# Altium footprint library WR-PHD_Pin Header_2.54mm.PcbLib: 137 footprints (part 9 of 9)
Each footprint in its own frame and in the unit in brackets; x right, y up, seen from the top. Pads: shape width x height; smd on the part's side, far side on the other; paste and mask are expansions set on the pad; w line width, h text height; cw(c..) or ccw(c..) is an arc to the next point about the centre after c.
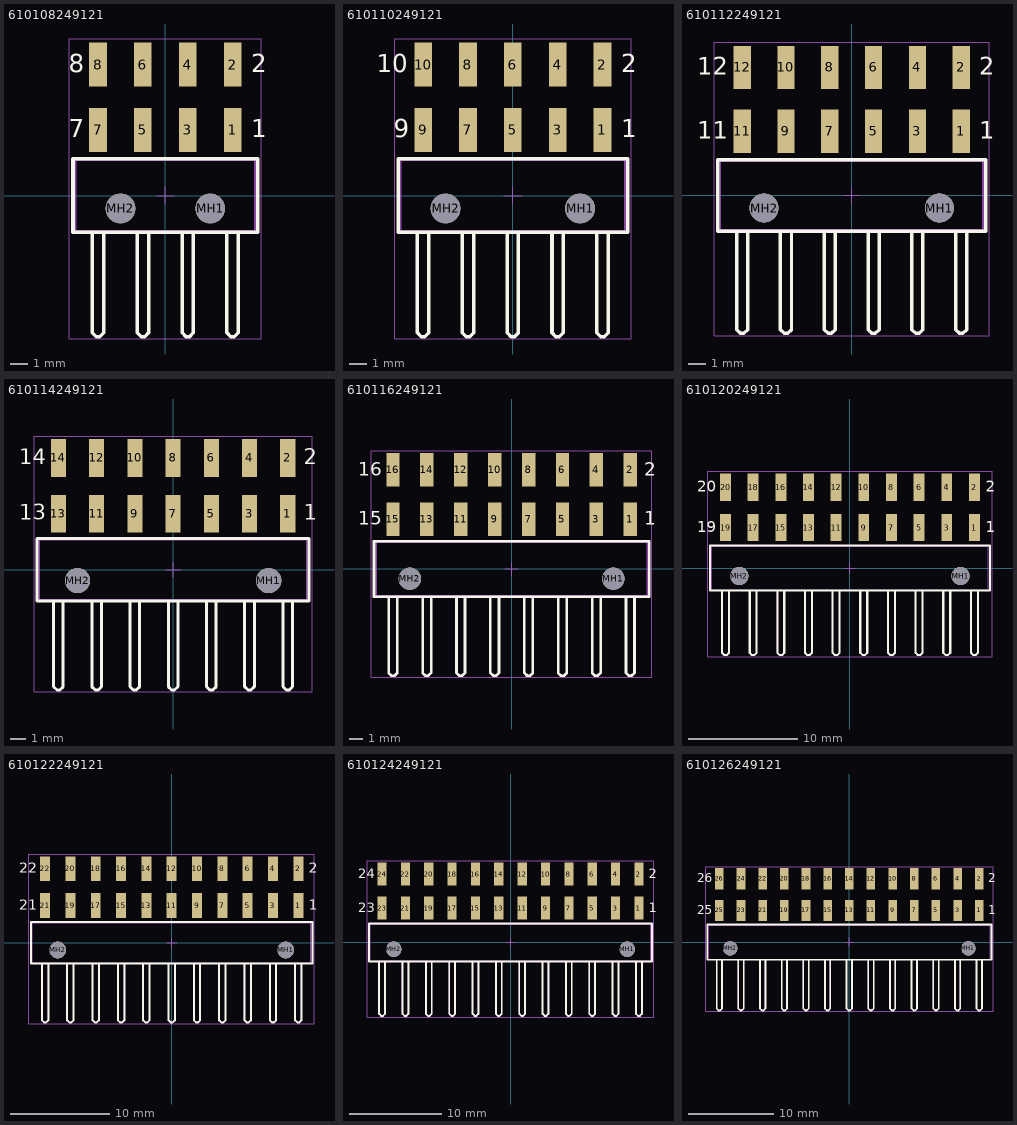
[diagram p8: the footprints below, top view; thin cyan lines are the x and y axes]

## 610108249121 [mm] "Pin Header, pitch 2.54 mm, SMD, Angled, dual row, 8p"
height 5.08
pads (10):
  rect 1x2.5 smd: 1(3.81,3.72) 2(3.81,7.42) 3(1.27,3.72) 4(1.27,7.42) 5(-1.27,3.72) 6(-1.27,7.42) 7(-3.81,3.72) 8(-3.81,7.42)
  round 1.68 hole 1.68 unplated: MH1(2.54,-0.73) MH2(-2.54,-0.73)
Top Overlay:
  lines w0.2: -4.13,-2.075 -4.13,-7.375 -4.13,-7.655 -4.13,-7.78 -3.91,-8 -3.71,-8 -3.49,-7.78 -3.49,-7.655 -3.49,-7.375 -3.49,-2.075 ; -1.59,-2.075 -1.59,-7.375 -1.59,-7.655 -1.59,-7.78 -1.37,-8 -1.17,-8 -0.95,-7.78 -0.95,-7.655 -0.95,-7.375 -0.95,-2.075 ; 0.95,-2.075 0.95,-7.375 0.95,-7.655 0.95,-7.78 1.17,-8 1.37,-8 1.59,-7.78 1.59,-7.655 1.59,-7.375 1.59,-2.075 ; 3.49,-2.075 3.49,-7.375 3.49,-7.655 3.49,-7.78 3.71,-8 3.91,-8 4.13,-7.78 4.13,-7.655 4.13,-7.375 4.13,-2.075 ; -5.23,-2.075 -5.23,2.075 5.23,2.075 5.23,-2.075 -5.23,-2.075
  text "2" at 4.87,7 h1.02
  text "1" at 4.87,3.3 h1.02
  text "8" at -5.47,7 h1.02
  text "7" at -5.47,3.3 h1.02
Mechanical 13:
  lines w0.1: -4.13,-2 -4.13,-7.375 -4.13,-7.655 -4.13,-7.78 -3.91,-8 -3.71,-8 -3.49,-7.78 -3.49,-7.655 -3.49,-7.375 -3.49,-2 ; -1.59,-2 -1.59,-7.375 -1.59,-7.655 -1.59,-7.78 -1.37,-8 -1.17,-8 -0.95,-7.78 -0.95,-7.655 -0.95,-7.375 -0.95,-2 ; 0.95,-2 0.95,-7.375 0.95,-7.655 0.95,-7.78 1.17,-8 1.37,-8 1.59,-7.78 1.59,-7.655 1.59,-7.375 1.59,-2 ; 3.49,-2 3.49,-7.375 3.49,-7.655 3.49,-7.78 3.71,-8 3.91,-8 4.13,-7.78 4.13,-7.655 4.13,-7.375 4.13,-2 ; -5.08,-2 5.08,-2 5.08,2 -5.08,2 -5.08,-2
Mechanical 15:
  lines w0.05: -0.5,0 0.5,0 ; 0,-0.5 0,0.5 ; -5.43,-8.125 -5.43,8.87 5.43,8.87 5.43,-8.125 -5.43,-8.125
3D body "610108249121.stp": height 5.1, standoff -1.38, extent -5.08,-8 5.08,8.16

## 610110249121 [mm] "Pin Header, pitch 2.54 mm, SMD, Angled, dual row, 10p"
height 5.08
pads (12):
  rect 1x2.5 smd: 1(5.08,3.72) 2(5.08,7.42) 3(2.54,3.72) 4(2.54,7.42) 5(0,3.72) 6(0,7.42) 7(-2.54,3.72) 8(-2.54,7.42) 9(-5.08,3.72) 10(-5.08,7.42)
  round 1.68 hole 1.68 unplated: MH1(3.81,-0.73) MH2(-3.81,-0.73)
Top Overlay:
  lines w0.2: -5.4,-2.075 -5.4,-7.375 -5.4,-7.655 -5.4,-7.78 -5.18,-8 -4.98,-8 -4.76,-7.78 -4.76,-7.655 -4.76,-7.375 -4.76,-2.075 ; -2.86,-2.075 -2.86,-7.375 -2.86,-7.655 -2.86,-7.78 -2.64,-8 -2.44,-8 -2.22,-7.78 -2.22,-7.655 -2.22,-7.375 -2.22,-2.075 ; -0.32,-2.075 -0.32,-7.375 -0.32,-7.655 -0.32,-7.78 -0.1,-8 0.1,-8 0.32,-7.78 0.32,-7.655 0.32,-7.375 0.32,-2.075 ; 2.22,-2.075 2.22,-7.375 2.22,-7.655 2.22,-7.78 2.44,-8 2.64,-8 2.86,-7.78 2.86,-7.655 2.86,-7.375 2.86,-2.075 ; 4.76,-2.075 4.76,-7.375 4.76,-7.655 4.76,-7.78 4.98,-8 5.18,-8 5.4,-7.78 5.4,-7.655 5.4,-7.375 5.4,-2.075 ; -6.5,-2.075 6.5,-2.075 6.5,2.075 -6.5,2.075 -6.5,-2.075
  text "1" at 6.14,3.3 h1.02
  text "2" at 6.14,7 h1.02
  text "10" at -7.7,7 h1.02
  text "9" at -6.74,3.3 h1.02
Mechanical 13:
  lines w0.1: -5.4,-2 -5.4,-7.375 -5.4,-7.655 -5.4,-7.78 -5.18,-8 -4.98,-8 -4.76,-7.78 -4.76,-7.655 -4.76,-7.375 -4.76,-2 ; -2.86,-2 -2.86,-7.375 -2.86,-7.655 -2.86,-7.78 -2.64,-8 -2.44,-8 -2.22,-7.78 -2.22,-7.655 -2.22,-7.375 -2.22,-2 ; -0.32,-2 -0.32,-7.375 -0.32,-7.655 -0.32,-7.78 -0.1,-8 0.1,-8 0.32,-7.78 0.32,-7.655 0.32,-7.375 0.32,-2 ; 2.22,-2 2.22,-7.375 2.22,-7.655 2.22,-7.78 2.44,-8 2.64,-8 2.86,-7.78 2.86,-7.655 2.86,-7.375 2.86,-2 ; 4.76,-2 4.76,-7.375 4.76,-7.655 4.76,-7.78 4.98,-8 5.18,-8 5.4,-7.78 5.4,-7.655 5.4,-7.375 5.4,-2 ; -6.35,-2 -6.35,2 6.35,2 6.35,-2 -6.35,-2
Mechanical 15:
  lines w0.05: -0.5,0 0.5,0 ; 0,-0.5 0,0.5 ; -6.7,-8.125 6.7,-8.125 6.7,8.87 -6.7,8.87 -6.7,-8.125
3D body "610110249121.stp": height 5.1, standoff -1.38, extent -6.35,-8 6.35,8.16

## 610112249121 [mm] "Pin Header, pitch 2.54 mm, SMD, Angled, dual row, 12p"
height 5.08
pads (14):
  rect 1x2.5 smd: 1(6.35,3.72) 2(6.35,7.42) 3(3.81,3.72) 4(3.81,7.42) 5(1.27,3.72) 6(1.27,7.42) 7(-1.27,3.72) 8(-1.27,7.42) 9(-3.81,3.72) 10(-3.81,7.42) 11(-6.35,3.72) 12(-6.35,7.42)
  round 1.68 hole 1.68 unplated: MH1(5.08,-0.73) MH2(-5.08,-0.73)
Top Overlay:
  lines w0.2: -6.67,-2.075 -6.67,-7.375 -6.67,-7.655 -6.67,-7.78 -6.45,-8 -6.25,-8 -6.03,-7.78 -6.03,-7.655 -6.03,-7.375 -6.03,-2.075 ; -4.13,-2.075 -4.13,-7.375 -4.13,-7.655 -4.13,-7.78 -3.91,-8 -3.71,-8 -3.49,-7.78 -3.49,-7.655 -3.49,-7.375 -3.49,-2.075 ; -1.59,-2.075 -1.59,-7.375 -1.59,-7.655 -1.59,-7.78 -1.37,-8 -1.17,-8 -0.95,-7.78 -0.95,-7.655 -0.95,-7.375 -0.95,-2.075 ; 0.95,-2.075 0.95,-7.375 0.95,-7.655 0.95,-7.78 1.17,-8 1.37,-8 1.59,-7.78 1.59,-7.655 1.59,-7.375 1.59,-2.075 ; 3.49,-2.075 3.49,-7.375 3.49,-7.655 3.49,-7.78 3.71,-8 3.91,-8 4.13,-7.78 4.13,-7.655 4.13,-7.375 4.13,-2.075 ; 6.03,-2.075 6.03,-7.375 6.03,-7.655 6.03,-7.78 6.25,-8 6.45,-8 6.67,-7.78 6.67,-7.655 6.67,-7.375 6.67,-2.075 ; -7.77,-2.075 7.77,-2.075 7.77,2.075 -7.77,2.075 -7.77,-2.075
  text "1" at 7.41,3.3 h1.02
  text "2" at 7.41,7 h1.02
  text "11" at -8.97,3.3 h1.02
  text "12" at -8.97,7 h1.02
Mechanical 13:
  lines w0.1: -6.67,-2 -6.67,-7.375 -6.67,-7.655 -6.67,-7.78 -6.45,-8 -6.25,-8 -6.03,-7.78 -6.03,-7.655 -6.03,-7.375 -6.03,-2 ; -4.13,-2 -4.13,-7.375 -4.13,-7.655 -4.13,-7.78 -3.91,-8 -3.71,-8 -3.49,-7.78 -3.49,-7.655 -3.49,-7.375 -3.49,-2 ; -1.59,-2 -1.59,-7.375 -1.59,-7.655 -1.59,-7.78 -1.37,-8 -1.17,-8 -0.95,-7.78 -0.95,-7.655 -0.95,-7.375 -0.95,-2 ; 0.95,-2 0.95,-7.375 0.95,-7.655 0.95,-7.78 1.17,-8 1.37,-8 1.59,-7.78 1.59,-7.655 1.59,-7.375 1.59,-2 ; 3.49,-2 3.49,-7.375 3.49,-7.655 3.49,-7.78 3.71,-8 3.91,-8 4.13,-7.78 4.13,-7.655 4.13,-7.375 4.13,-2 ; 6.03,-2 6.03,-7.375 6.03,-7.655 6.03,-7.78 6.25,-8 6.45,-8 6.67,-7.78 6.67,-7.655 6.67,-7.375 6.67,-2 ; -7.62,-2 -7.62,2 7.62,2 7.62,-2 -7.62,-2
Mechanical 15:
  lines w0.05: -0.5,0 0.5,0 ; 0,-0.5 0,0.5 ; -7.97,-8.125 7.97,-8.125 7.97,8.87 -7.97,8.87 -7.97,-8.125
3D body "610112249121.stp": height 5.1, standoff -1.38, extent -7.62,-8 7.62,8.16

## 610114249121 [mm] "Pin Header, pitch 2.54 mm, SMD, Angled, dual row, 14p"
height 5.08
pads (16):
  rect 1x2.5 smd: 1(7.62,3.72) 2(7.62,7.42) 3(5.08,3.72) 4(5.08,7.42) 5(2.54,3.72) 6(2.54,7.42) 7(0,3.72) 8(0,7.42) 9(-2.54,3.72) 10(-2.54,7.42) 11(-5.08,3.72) 12(-5.08,7.42) 13(-7.62,3.72) 14(-7.62,7.42)
  round 1.68 hole 1.68 unplated: MH1(6.35,-0.73) MH2(-6.35,-0.73)
Top Overlay:
  lines w0.2: -7.94,-2.075 -7.94,-7.375 -7.94,-7.655 -7.94,-7.78 -7.72,-8 -7.52,-8 -7.3,-7.78 -7.3,-7.655 -7.3,-7.375 -7.3,-2.075 ; -5.4,-2.075 -5.4,-7.375 -5.4,-7.655 -5.4,-7.78 -5.18,-8 -4.98,-8 -4.76,-7.78 -4.76,-7.655 -4.76,-7.375 -4.76,-2.075 ; -2.86,-2.075 -2.86,-7.375 -2.86,-7.655 -2.86,-7.78 -2.64,-8 -2.44,-8 -2.22,-7.78 -2.22,-7.655 -2.22,-7.375 -2.22,-2.075 ; -0.32,-2.075 -0.32,-7.375 -0.32,-7.655 -0.32,-7.78 -0.1,-8 0.1,-8 0.32,-7.78 0.32,-7.655 0.32,-7.375 0.32,-2.075 ; 2.22,-2.075 2.22,-7.375 2.22,-7.655 2.22,-7.78 2.44,-8 2.64,-8 2.86,-7.78 2.86,-7.655 2.86,-7.375 2.86,-2.075 ; 4.76,-2.075 4.76,-7.375 4.76,-7.655 4.76,-7.78 4.98,-8 5.18,-8 5.4,-7.78 5.4,-7.655 5.4,-7.375 5.4,-2.075 ; 7.3,-2.075 7.3,-7.375 7.3,-7.655 7.3,-7.78 7.52,-8 7.72,-8 7.94,-7.78 7.94,-7.655 7.94,-7.375 7.94,-2.075 ; -9.04,-2.075 9.04,-2.075 9.04,2.075 -9.04,2.075 -9.04,-2.075
  text "1" at 8.68,3.3 h1.02
  text "2" at 8.68,7 h1.02
  text "14" at -10.24,7 h1.02
  text "13" at -10.24,3.3 h1.02
Mechanical 13:
  lines w0.1: -7.94,-2 -7.94,-7.375 -7.94,-7.655 -7.94,-7.78 -7.72,-8 -7.52,-8 -7.3,-7.78 -7.3,-7.655 -7.3,-7.375 -7.3,-2 ; -5.4,-2 -5.4,-7.375 -5.4,-7.655 -5.4,-7.78 -5.18,-8 -4.98,-8 -4.76,-7.78 -4.76,-7.655 -4.76,-7.375 -4.76,-2 ; -2.86,-2 -2.86,-7.375 -2.86,-7.655 -2.86,-7.78 -2.64,-8 -2.44,-8 -2.22,-7.78 -2.22,-7.655 -2.22,-7.375 -2.22,-2 ; -0.32,-2 -0.32,-7.375 -0.32,-7.655 -0.32,-7.78 -0.1,-8 0.1,-8 0.32,-7.78 0.32,-7.655 0.32,-7.375 0.32,-2 ; 2.22,-2 2.22,-7.375 2.22,-7.655 2.22,-7.78 2.44,-8 2.64,-8 2.86,-7.78 2.86,-7.655 2.86,-7.375 2.86,-2 ; 4.76,-2 4.76,-7.375 4.76,-7.655 4.76,-7.78 4.98,-8 5.18,-8 5.4,-7.78 5.4,-7.655 5.4,-7.375 5.4,-2 ; 7.3,-2 7.3,-7.375 7.3,-7.655 7.3,-7.78 7.52,-8 7.72,-8 7.94,-7.78 7.94,-7.655 7.94,-7.375 7.94,-2 ; -8.89,-2 -8.89,2 8.89,2 8.89,-2 -8.89,-2
Mechanical 15:
  lines w0.05: -0.5,0 0.5,0 ; 0,-0.5 0,0.5 ; -9.24,-8.125 9.24,-8.125 9.24,8.87 -9.24,8.87 -9.24,-8.125
3D body "610114249121.stp": height 5.1, standoff -1.38, extent -8.89,-8 8.89,8.16

## 610116249121 [mm] "Pin Header, pitch 2.54 mm, SMD, Angled, dual row, 16p"
height 5.08
pads (18):
  rect 1x2.5 smd: 1(8.89,3.72) 2(8.89,7.42) 3(6.35,3.72) 4(6.35,7.42) 5(3.81,3.72) 6(3.81,7.42) 7(1.27,3.72) 8(1.27,7.42) 9(-1.27,3.72) 10(-1.27,7.42) 11(-3.81,3.72) 12(-3.81,7.42) 13(-6.35,3.72) 14(-6.35,7.42) 15(-8.89,3.72) 16(-8.89,7.42)
  round 1.68 hole 1.68 unplated: MH1(7.62,-0.73) MH2(-7.62,-0.73)
Top Overlay:
  lines w0.2: -9.21,-2.075 -9.21,-7.375 -9.21,-7.655 -9.21,-7.78 -8.99,-8 -8.79,-8 -8.57,-7.78 -8.57,-7.655 -8.57,-7.375 -8.57,-2.075 ; -6.67,-2.075 -6.67,-7.375 -6.67,-7.655 -6.67,-7.78 -6.45,-8 -6.25,-8 -6.03,-7.78 -6.03,-7.655 -6.03,-7.375 -6.03,-2.075 ; -4.13,-2.075 -4.13,-7.375 -4.13,-7.655 -4.13,-7.78 -3.91,-8 -3.71,-8 -3.49,-7.78 -3.49,-7.655 -3.49,-7.375 -3.49,-2.075 ; -1.59,-2.075 -1.59,-7.375 -1.59,-7.655 -1.59,-7.78 -1.37,-8 -1.17,-8 -0.95,-7.78 -0.95,-7.655 -0.95,-7.375 -0.95,-2.075 ; 0.95,-2.075 0.95,-7.375 0.95,-7.655 0.95,-7.78 1.17,-8 1.37,-8 1.59,-7.78 1.59,-7.655 1.59,-7.375 1.59,-2.075 ; 3.49,-2.075 3.49,-7.375 3.49,-7.655 3.49,-7.78 3.71,-8 3.91,-8 4.13,-7.78 4.13,-7.655 4.13,-7.375 4.13,-2.075 ; 6.03,-2.075 6.03,-7.375 6.03,-7.655 6.03,-7.78 6.25,-8 6.45,-8 6.67,-7.78 6.67,-7.655 6.67,-7.375 6.67,-2.075 ; 8.57,-2.075 8.57,-7.375 8.57,-7.655 8.57,-7.78 8.79,-8 8.99,-8 9.21,-7.78 9.21,-7.655 9.21,-7.375 9.21,-2.075 ; -10.31,-2.075 10.31,-2.075 10.31,2.075 -10.31,2.075 -10.31,-2.075
  text "1" at 9.95,3.3 h1.02
  text "2" at 9.95,7 h1.02
  text "16" at -11.51,7 h1.02
  text "15" at -11.51,3.3 h1.02
Mechanical 13:
  lines w0.1: -9.21,-2 -9.21,-7.375 -9.21,-7.655 -9.21,-7.78 -8.99,-8 -8.79,-8 -8.57,-7.78 -8.57,-7.655 -8.57,-7.375 -8.57,-2 ; -6.67,-2 -6.67,-7.375 -6.67,-7.655 -6.67,-7.78 -6.45,-8 -6.25,-8 -6.03,-7.78 -6.03,-7.655 -6.03,-7.375 -6.03,-2 ; -4.13,-2 -4.13,-7.375 -4.13,-7.655 -4.13,-7.78 -3.91,-8 -3.71,-8 -3.49,-7.78 -3.49,-7.655 -3.49,-7.375 -3.49,-2 ; -1.59,-2 -1.59,-7.375 -1.59,-7.655 -1.59,-7.78 -1.37,-8 -1.17,-8 -0.95,-7.78 -0.95,-7.655 -0.95,-7.375 -0.95,-2 ; 0.95,-2 0.95,-7.375 0.95,-7.655 0.95,-7.78 1.17,-8 1.37,-8 1.59,-7.78 1.59,-7.655 1.59,-7.375 1.59,-2 ; 3.49,-2 3.49,-7.375 3.49,-7.655 3.49,-7.78 3.71,-8 3.91,-8 4.13,-7.78 4.13,-7.655 4.13,-7.375 4.13,-2 ; 6.03,-2 6.03,-7.375 6.03,-7.655 6.03,-7.78 6.25,-8 6.45,-8 6.67,-7.78 6.67,-7.655 6.67,-7.375 6.67,-2 ; 8.57,-2 8.57,-7.375 8.57,-7.655 8.57,-7.78 8.79,-8 8.99,-8 9.21,-7.78 9.21,-7.655 9.21,-7.375 9.21,-2 ; -10.16,-2 -10.16,2 10.16,2 10.16,-2 -10.16,-2
Mechanical 15:
  lines w0.05: -0.5,0 0.5,0 ; 0,-0.5 0,0.5 ; -10.51,-8.125 10.51,-8.125 10.51,8.87 -10.51,8.87 -10.51,-8.125
3D body "610116249121.stp": height 5.1, standoff -1.38, extent -10.16,-8 10.16,8.16

## 610120249121 [mm] "Pin Header, pitch 2.54 mm, SMD, Angled, dual row, 20p"
height 5.08
pads (22):
  rect 1x2.5 smd: 1(11.43,3.72) 2(11.43,7.42) 3(8.89,3.72) 4(8.89,7.42) 5(6.35,3.72) 6(6.35,7.42) 7(3.81,3.72) 8(3.81,7.42) 9(1.27,3.72) 10(1.27,7.42) 11(-1.27,3.72) 12(-1.27,7.42) 13(-3.81,3.72) 14(-3.81,7.42) 15(-6.35,3.72) 16(-6.35,7.42) 17(-8.89,3.72) 18(-8.89,7.42) 19(-11.43,3.72) 20(-11.43,7.42)
  round 1.68 hole 1.68 unplated: MH1(10.16,-0.73) MH2(-10.16,-0.73)
Top Overlay:
  lines w0.2: -11.75,-2.075 -11.75,-7.375 -11.75,-7.655 -11.75,-7.78 -11.53,-8 -11.33,-8 -11.11,-7.78 -11.11,-7.655 -11.11,-7.375 -11.11,-2.075 ; -9.21,-2.075 -9.21,-7.375 -9.21,-7.655 -9.21,-7.78 -8.99,-8 -8.79,-8 -8.57,-7.78 -8.57,-7.655 -8.57,-7.375 -8.57,-2.075 ; -6.67,-2.075 -6.67,-7.375 -6.67,-7.655 -6.67,-7.78 -6.45,-8 -6.25,-8 -6.03,-7.78 -6.03,-7.655 -6.03,-7.375 -6.03,-2.075 ; -4.13,-2.075 -4.13,-7.375 -4.13,-7.655 -4.13,-7.78 -3.91,-8 -3.71,-8 -3.49,-7.78 -3.49,-7.655 -3.49,-7.375 -3.49,-2.075 ; -1.59,-2.075 -1.59,-7.375 -1.59,-7.655 -1.59,-7.78 -1.37,-8 -1.17,-8 -0.95,-7.78 -0.95,-7.655 -0.95,-7.375 -0.95,-2.075 ; 0.95,-2.075 0.95,-7.375 0.95,-7.655 0.95,-7.78 1.17,-8 1.37,-8 1.59,-7.78 1.59,-7.655 1.59,-7.375 1.59,-2.075 ; 3.49,-2.075 3.49,-7.375 3.49,-7.655 3.49,-7.78 3.71,-8 3.91,-8 4.13,-7.78 4.13,-7.655 4.13,-7.375 4.13,-2.075 ; 6.03,-2.075 6.03,-7.375 6.03,-7.655 6.03,-7.78 6.25,-8 6.45,-8 6.67,-7.78 6.67,-7.655 6.67,-7.375 6.67,-2.075 ; 8.57,-2.075 8.57,-7.375 8.57,-7.655 8.57,-7.78 8.79,-8 8.99,-8 9.21,-7.78 9.21,-7.655 9.21,-7.375 9.21,-2.075 ; 11.11,-2.075 11.11,-7.375 11.11,-7.655 11.11,-7.78 11.33,-8 11.53,-8 11.75,-7.78 11.75,-7.655 11.75,-7.375 11.75,-2.075 ; -12.85,-2.075 12.85,-2.075 12.85,2.075 -12.85,2.075 -12.85,-2.075
  text "1" at 12.49,3.3 h1.02
  text "2" at 12.49,7 h1.02
  text "20" at -14.05,7 h1.02
  text "19" at -14.05,3.3 h1.02
Mechanical 13:
  lines w0.1: -11.75,-2 -11.75,-7.375 -11.75,-7.655 -11.75,-7.78 -11.53,-8 -11.33,-8 -11.11,-7.78 -11.11,-7.655 -11.11,-7.375 -11.11,-2 ; -9.21,-2 -9.21,-7.375 -9.21,-7.655 -9.21,-7.78 -8.99,-8 -8.79,-8 -8.57,-7.78 -8.57,-7.655 -8.57,-7.375 -8.57,-2 ; -6.67,-2 -6.67,-7.375 -6.67,-7.655 -6.67,-7.78 -6.45,-8 -6.25,-8 -6.03,-7.78 -6.03,-7.655 -6.03,-7.375 -6.03,-2 ; -4.13,-2 -4.13,-7.375 -4.13,-7.655 -4.13,-7.78 -3.91,-8 -3.71,-8 -3.49,-7.78 -3.49,-7.655 -3.49,-7.375 -3.49,-2 ; -1.59,-2 -1.59,-7.375 -1.59,-7.655 -1.59,-7.78 -1.37,-8 -1.17,-8 -0.95,-7.78 -0.95,-7.655 -0.95,-7.375 -0.95,-2 ; 0.95,-2 0.95,-7.375 0.95,-7.655 0.95,-7.78 1.17,-8 1.37,-8 1.59,-7.78 1.59,-7.655 1.59,-7.375 1.59,-2 ; 3.49,-2 3.49,-7.375 3.49,-7.655 3.49,-7.78 3.71,-8 3.91,-8 4.13,-7.78 4.13,-7.655 4.13,-7.375 4.13,-2 ; 6.03,-2 6.03,-7.375 6.03,-7.655 6.03,-7.78 6.25,-8 6.45,-8 6.67,-7.78 6.67,-7.655 6.67,-7.375 6.67,-2 ; 8.57,-2 8.57,-7.375 8.57,-7.655 8.57,-7.78 8.79,-8 8.99,-8 9.21,-7.78 9.21,-7.655 9.21,-7.375 9.21,-2 ; 11.11,-2 11.11,-7.375 11.11,-7.655 11.11,-7.78 11.33,-8 11.53,-8 11.75,-7.78 11.75,-7.655 11.75,-7.375 11.75,-2 ; -12.7,-2 -12.7,2 12.7,2 12.7,-2 -12.7,-2
Mechanical 15:
  lines w0.05: -0.5,0 0.5,0 ; 0,-0.5 0,0.5 ; -13.05,-8.125 13.05,-8.125 13.05,8.87 -13.05,8.87 -13.05,-8.125
3D body "610120249121.stp": height 5.1, standoff -1.38, extent -12.7,-8 12.7,8.16

## 610122249121 [mm] "Pin Header, pitch 2.54 mm, SMD, Angled, dual row, 22p"
height 5.08
pads (24):
  rect 1x2.5 smd: 1(12.7,3.72) 2(12.7,7.42) 3(10.16,3.72) 4(10.16,7.42) 5(7.62,3.72) 6(7.62,7.42) 7(5.08,3.72) 8(5.08,7.42) 9(2.54,3.72) 10(2.54,7.42) 11(0,3.72) 12(0,7.42) 13(-2.54,3.72) 14(-2.54,7.42) 15(-5.08,3.72) 16(-5.08,7.42) 17(-7.62,3.72) 18(-7.62,7.42) 19(-10.16,3.72) 20(-10.16,7.42) 21(-12.7,3.72) 22(-12.7,7.42)
  round 1.68 hole 1.68 unplated: MH1(11.43,-0.73) MH2(-11.43,-0.73)
Top Overlay:
  lines w0.2: -13.02,-2.075 -13.02,-7.375 -13.02,-7.655 -13.02,-7.78 -12.8,-8 -12.6,-8 -12.38,-7.78 -12.38,-7.655 -12.38,-7.375 -12.38,-2.075 ; -10.48,-2.075 -10.48,-7.375 -10.48,-7.655 -10.48,-7.78 -10.26,-8 -10.06,-8 -9.84,-7.78 -9.84,-7.655 -9.84,-7.375 -9.84,-2.075 ; -7.94,-2.075 -7.94,-7.375 -7.94,-7.655 -7.94,-7.78 -7.72,-8 -7.52,-8 -7.3,-7.78 -7.3,-7.655 -7.3,-7.375 -7.3,-2.075 ; -5.4,-2.075 -5.4,-7.375 -5.4,-7.655 -5.4,-7.78 -5.18,-8 -4.98,-8 -4.76,-7.78 -4.76,-7.655 -4.76,-7.375 -4.76,-2.075 ; -2.86,-2.075 -2.86,-7.375 -2.86,-7.655 -2.86,-7.78 -2.64,-8 -2.44,-8 -2.22,-7.78 -2.22,-7.655 -2.22,-7.375 -2.22,-2.075 ; -0.32,-2.075 -0.32,-7.375 -0.32,-7.655 -0.32,-7.78 -0.1,-8 0.1,-8 0.32,-7.78 0.32,-7.655 0.32,-7.375 0.32,-2.075 ; 2.22,-2.075 2.22,-7.375 2.22,-7.655 2.22,-7.78 2.44,-8 2.64,-8 2.86,-7.78 2.86,-7.655 2.86,-7.375 2.86,-2.075 ; 4.76,-2.075 4.76,-7.375 4.76,-7.655 4.76,-7.78 4.98,-8 5.18,-8 5.4,-7.78 5.4,-7.655 5.4,-7.375 5.4,-2.075 ; 7.3,-2.075 7.3,-7.375 7.3,-7.655 7.3,-7.78 7.52,-8 7.72,-8 7.94,-7.78 7.94,-7.655 7.94,-7.375 7.94,-2.075 ; 9.84,-2.075 9.84,-7.375 9.84,-7.655 9.84,-7.78 10.06,-8 10.26,-8 10.48,-7.78 10.48,-7.655 10.48,-7.375 10.48,-2.075 ; 12.38,-2.075 12.38,-7.375 12.38,-7.655 12.38,-7.78 12.6,-8 12.8,-8 13.02,-7.78 13.02,-7.655 13.02,-7.375 13.02,-2.075 ; -14.12,-2.075 -14.12,2.075 14.12,2.075 14.12,-2.075 -14.12,-2.075
  text "21" at -15.32,3.3 h1.02
  text "22" at -15.32,7 h1.02
  text "2" at 13.76,7 h1.02
  text "1" at 13.76,3.3 h1.02
Mechanical 13:
  lines w0.1: -13.02,-2 -13.02,-7.375 -13.02,-7.655 -13.02,-7.78 -12.8,-8 -12.6,-8 -12.38,-7.78 -12.38,-7.655 -12.38,-7.375 -12.38,-2 ; -10.48,-2 -10.48,-7.375 -10.48,-7.655 -10.48,-7.78 -10.26,-8 -10.06,-8 -9.84,-7.78 -9.84,-7.655 -9.84,-7.375 -9.84,-2 ; -7.94,-2 -7.94,-7.375 -7.94,-7.655 -7.94,-7.78 -7.72,-8 -7.52,-8 -7.3,-7.78 -7.3,-7.655 -7.3,-7.375 -7.3,-2 ; -5.4,-2 -5.4,-7.375 -5.4,-7.655 -5.4,-7.78 -5.18,-8 -4.98,-8 -4.76,-7.78 -4.76,-7.655 -4.76,-7.375 -4.76,-2 ; -2.86,-2 -2.86,-7.375 -2.86,-7.655 -2.86,-7.78 -2.64,-8 -2.44,-8 -2.22,-7.78 -2.22,-7.655 -2.22,-7.375 -2.22,-2 ; -0.32,-2 -0.32,-7.375 -0.32,-7.655 -0.32,-7.78 -0.1,-8 0.1,-8 0.32,-7.78 0.32,-7.655 0.32,-7.375 0.32,-2 ; 2.22,-2 2.22,-7.375 2.22,-7.655 2.22,-7.78 2.44,-8 2.64,-8 2.86,-7.78 2.86,-7.655 2.86,-7.375 2.86,-2 ; 4.76,-2 4.76,-7.375 4.76,-7.655 4.76,-7.78 4.98,-8 5.18,-8 5.4,-7.78 5.4,-7.655 5.4,-7.375 5.4,-2 ; 7.3,-2 7.3,-7.375 7.3,-7.655 7.3,-7.78 7.52,-8 7.72,-8 7.94,-7.78 7.94,-7.655 7.94,-7.375 7.94,-2 ; 9.84,-2 9.84,-7.375 9.84,-7.655 9.84,-7.78 10.06,-8 10.26,-8 10.48,-7.78 10.48,-7.655 10.48,-7.375 10.48,-2 ; 12.38,-2 12.38,-7.375 12.38,-7.655 12.38,-7.78 12.6,-8 12.8,-8 13.02,-7.78 13.02,-7.655 13.02,-7.375 13.02,-2 ; -13.97,-2 13.97,-2 13.97,2 -13.97,2 -13.97,-2
Mechanical 15:
  lines w0.05: -0.5,0 0.5,0 ; 0,-0.5 0,0.5 ; -14.32,-8.125 -14.32,8.87 14.32,8.87 14.32,-8.125 -14.32,-8.125
3D body "610122249121.stp": height 5.1, standoff -1.38, extent -13.97,-8 13.97,8.16

## 610124249121 [mm] "Pin Header, pitch 2.54 mm, SMD, Angled, dual row, 24p"
height 5.08
pads (26):
  rect 1x2.5 smd: 1(13.97,3.72) 2(13.97,7.42) 3(11.43,3.72) 4(11.43,7.42) 5(8.89,3.72) 6(8.89,7.42) 7(6.35,3.72) 8(6.35,7.42) 9(3.81,3.72) 10(3.81,7.42) 11(1.27,3.72) 12(1.27,7.42) 13(-1.27,3.72) 14(-1.27,7.42) 15(-3.81,3.72) 16(-3.81,7.42) 17(-6.35,3.72) 18(-6.35,7.42) 19(-8.89,3.72) 20(-8.89,7.42) 21(-11.43,3.72) 22(-11.43,7.42) 23(-13.97,3.72) 24(-13.97,7.42)
  round 1.68 hole 1.68 unplated: MH1(12.7,-0.73) MH2(-12.7,-0.73)
Top Overlay:
  lines w0.2: -14.29,-2.075 -14.29,-7.375 -14.29,-7.655 -14.29,-7.78 -14.07,-8 -13.87,-8 -13.65,-7.78 -13.65,-7.655 -13.65,-7.375 -13.65,-2.075 ; -11.75,-2.075 -11.75,-7.375 -11.75,-7.655 -11.75,-7.78 -11.53,-8 -11.33,-8 -11.11,-7.78 -11.11,-7.655 -11.11,-7.375 -11.11,-2.075 ; -9.21,-2.075 -9.21,-7.375 -9.21,-7.655 -9.21,-7.78 -8.99,-8 -8.79,-8 -8.57,-7.78 -8.57,-7.655 -8.57,-7.375 -8.57,-2.075 ; -6.67,-2.075 -6.67,-7.375 -6.67,-7.655 -6.67,-7.78 -6.45,-8 -6.25,-8 -6.03,-7.78 -6.03,-7.655 -6.03,-7.375 -6.03,-2.075 ; -4.13,-2.075 -4.13,-7.375 -4.13,-7.655 -4.13,-7.78 -3.91,-8 -3.71,-8 -3.49,-7.78 -3.49,-7.655 -3.49,-7.375 -3.49,-2.075 ; -1.59,-2.075 -1.59,-7.375 -1.59,-7.655 -1.59,-7.78 -1.37,-8 -1.17,-8 -0.95,-7.78 -0.95,-7.655 -0.95,-7.375 -0.95,-2.075 ; 0.95,-2.075 0.95,-7.375 0.95,-7.655 0.95,-7.78 1.17,-8 1.37,-8 1.59,-7.78 1.59,-7.655 1.59,-7.375 1.59,-2.075 ; 3.49,-2.075 3.49,-7.375 3.49,-7.655 3.49,-7.78 3.71,-8 3.91,-8 4.13,-7.78 4.13,-7.655 4.13,-7.375 4.13,-2.075 ; 6.03,-2.075 6.03,-7.375 6.03,-7.655 6.03,-7.78 6.25,-8 6.45,-8 6.67,-7.78 6.67,-7.655 6.67,-7.375 6.67,-2.075 ; 8.57,-2.075 8.57,-7.375 8.57,-7.655 8.57,-7.78 8.79,-8 8.99,-8 9.21,-7.78 9.21,-7.655 9.21,-7.375 9.21,-2.075 ; 11.11,-2.075 11.11,-7.375 11.11,-7.655 11.11,-7.78 11.33,-8 11.53,-8 11.75,-7.78 11.75,-7.655 11.75,-7.375 11.75,-2.075 ; 13.65,-2.075 13.65,-7.375 13.65,-7.655 13.65,-7.78 13.87,-8 14.07,-8 14.29,-7.78 14.29,-7.655 14.29,-7.375 14.29,-2.075 ; -15.39,-2.075 15.39,-2.075 15.39,2.075 -15.39,2.075 -15.39,-2.075
  text "1" at 15.03,3.3 h1.02
  text "2" at 15.03,7 h1.02
  text "24" at -16.59,7 h1.02
  text "23" at -16.59,3.3 h1.02
Mechanical 13:
  lines w0.1: -14.29,-2 -14.29,-7.375 -14.29,-7.655 -14.29,-7.78 -14.07,-8 -13.87,-8 -13.65,-7.78 -13.65,-7.655 -13.65,-7.375 -13.65,-2 ; -11.75,-2 -11.75,-7.375 -11.75,-7.655 -11.75,-7.78 -11.53,-8 -11.33,-8 -11.11,-7.78 -11.11,-7.655 -11.11,-7.375 -11.11,-2 ; -9.21,-2 -9.21,-7.375 -9.21,-7.655 -9.21,-7.78 -8.99,-8 -8.79,-8 -8.57,-7.78 -8.57,-7.655 -8.57,-7.375 -8.57,-2 ; -6.67,-2 -6.67,-7.375 -6.67,-7.655 -6.67,-7.78 -6.45,-8 -6.25,-8 -6.03,-7.78 -6.03,-7.655 -6.03,-7.375 -6.03,-2 ; -4.13,-2 -4.13,-7.375 -4.13,-7.655 -4.13,-7.78 -3.91,-8 -3.71,-8 -3.49,-7.78 -3.49,-7.655 -3.49,-7.375 -3.49,-2 ; -1.59,-2 -1.59,-7.375 -1.59,-7.655 -1.59,-7.78 -1.37,-8 -1.17,-8 -0.95,-7.78 -0.95,-7.655 -0.95,-7.375 -0.95,-2 ; 0.95,-2 0.95,-7.375 0.95,-7.655 0.95,-7.78 1.17,-8 1.37,-8 1.59,-7.78 1.59,-7.655 1.59,-7.375 1.59,-2 ; 3.49,-2 3.49,-7.375 3.49,-7.655 3.49,-7.78 3.71,-8 3.91,-8 4.13,-7.78 4.13,-7.655 4.13,-7.375 4.13,-2 ; 6.03,-2 6.03,-7.375 6.03,-7.655 6.03,-7.78 6.25,-8 6.45,-8 6.67,-7.78 6.67,-7.655 6.67,-7.375 6.67,-2 ; 8.57,-2 8.57,-7.375 8.57,-7.655 8.57,-7.78 8.79,-8 8.99,-8 9.21,-7.78 9.21,-7.655 9.21,-7.375 9.21,-2 ; 11.11,-2 11.11,-7.375 11.11,-7.655 11.11,-7.78 11.33,-8 11.53,-8 11.75,-7.78 11.75,-7.655 11.75,-7.375 11.75,-2 ; 13.65,-2 13.65,-7.375 13.65,-7.655 13.65,-7.78 13.87,-8 14.07,-8 14.29,-7.78 14.29,-7.655 14.29,-7.375 14.29,-2 ; -15.24,-2 -15.24,2 15.24,2 15.24,-2 -15.24,-2
Mechanical 15:
  lines w0.05: -0.5,0 0.5,0 ; 0,-0.5 0,0.5 ; -15.59,-8.125 15.59,-8.125 15.59,8.87 -15.59,8.87 -15.59,-8.125
3D body "610124249121.stp": height 5.1, standoff -1.38, extent -15.24,-8 15.24,8.16

## 610126249121 [mm] "Pin Header, pitch 2.54 mm, SMD, Angled, dual row, 26p"
height 5.08
pads (28):
  rect 1x2.5 smd: 1(15.24,3.72) 2(15.24,7.42) 3(12.7,3.72) 4(12.7,7.42) 5(10.16,3.72) 6(10.16,7.42) 7(7.62,3.72) 8(7.62,7.42) 9(5.08,3.72) 10(5.08,7.42) 11(2.54,3.72) 12(2.54,7.42) 13(0,3.72) 14(0,7.42) 15(-2.54,3.72) 16(-2.54,7.42) 17(-5.08,3.72) 18(-5.08,7.42) 19(-7.62,3.72) 20(-7.62,7.42) 21(-10.16,3.72) 22(-10.16,7.42) 23(-12.7,3.72) 24(-12.7,7.42) 25(-15.24,3.72) 26(-15.24,7.42)
  round 1.68 hole 1.68 unplated: MH1(13.97,-0.73) MH2(-13.97,-0.73)
Top Overlay:
  lines w0.2: -15.56,-2.075 -15.56,-7.375 -15.56,-7.655 -15.56,-7.78 -15.34,-8 -15.14,-8 -14.92,-7.78 -14.92,-7.655 -14.92,-7.375 -14.92,-2.075 ; -13.02,-2.075 -13.02,-7.375 -13.02,-7.655 -13.02,-7.78 -12.8,-8 -12.6,-8 -12.38,-7.78 -12.38,-7.655 -12.38,-7.375 -12.38,-2.075 ; -10.48,-2.075 -10.48,-7.375 -10.48,-7.655 -10.48,-7.78 -10.26,-8 -10.06,-8 -9.84,-7.78 -9.84,-7.655 -9.84,-7.375 -9.84,-2.075 ; -7.94,-2.075 -7.94,-7.375 -7.94,-7.655 -7.94,-7.78 -7.72,-8 -7.52,-8 -7.3,-7.78 -7.3,-7.655 -7.3,-7.375 -7.3,-2.075 ; -5.4,-2.075 -5.4,-7.375 -5.4,-7.655 -5.4,-7.78 -5.18,-8 -4.98,-8 -4.76,-7.78 -4.76,-7.655 -4.76,-7.375 -4.76,-2.075 ; -2.86,-2.075 -2.86,-7.375 -2.86,-7.655 -2.86,-7.78 -2.64,-8 -2.44,-8 -2.22,-7.78 -2.22,-7.655 -2.22,-7.375 -2.22,-2.075 ; -0.32,-2.075 -0.32,-7.375 -0.32,-7.655 -0.32,-7.78 -0.1,-8 0.1,-8 0.32,-7.78 0.32,-7.655 0.32,-7.375 0.32,-2.075 ; 2.22,-2.075 2.22,-7.375 2.22,-7.655 2.22,-7.78 2.44,-8 2.64,-8 2.86,-7.78 2.86,-7.655 2.86,-7.375 2.86,-2.075 ; 4.76,-2.075 4.76,-7.375 4.76,-7.655 4.76,-7.78 4.98,-8 5.18,-8 5.4,-7.78 5.4,-7.655 5.4,-7.375 5.4,-2.075 ; 7.3,-2.075 7.3,-7.375 7.3,-7.655 7.3,-7.78 7.52,-8 7.72,-8 7.94,-7.78 7.94,-7.655 7.94,-7.375 7.94,-2.075 ; 9.84,-2.075 9.84,-7.375 9.84,-7.655 9.84,-7.78 10.06,-8 10.26,-8 10.48,-7.78 10.48,-7.655 10.48,-7.375 10.48,-2.075 ; 12.38,-2.075 12.38,-7.375 12.38,-7.655 12.38,-7.78 12.6,-8 12.8,-8 13.02,-7.78 13.02,-7.655 13.02,-7.375 13.02,-2.075 ; 14.92,-2.075 14.92,-7.375 14.92,-7.655 14.92,-7.78 15.14,-8 15.34,-8 15.56,-7.78 15.56,-7.655 15.56,-7.375 15.56,-2.075 ; -16.66,-2.075 -16.66,2.075 16.66,2.075 16.66,-2.075 -16.66,-2.075
  text "25" at -17.86,3.3 h1.02
  text "26" at -17.86,7 h1.02
  text "2" at 16.3,7 h1.02
  text "1" at 16.3,3.3 h1.02
Mechanical 13:
  lines w0.1: -15.56,-2 -15.56,-7.375 -15.56,-7.655 -15.56,-7.78 -15.34,-8 -15.14,-8 -14.92,-7.78 -14.92,-7.655 -14.92,-7.375 -14.92,-2 ; -13.02,-2 -13.02,-7.375 -13.02,-7.655 -13.02,-7.78 -12.8,-8 -12.6,-8 -12.38,-7.78 -12.38,-7.655 -12.38,-7.375 -12.38,-2 ; -10.48,-2 -10.48,-7.375 -10.48,-7.655 -10.48,-7.78 -10.26,-8 -10.06,-8 -9.84,-7.78 -9.84,-7.655 -9.84,-7.375 -9.84,-2 ; -7.94,-2 -7.94,-7.375 -7.94,-7.655 -7.94,-7.78 -7.72,-8 -7.52,-8 -7.3,-7.78 -7.3,-7.655 -7.3,-7.375 -7.3,-2 ; -5.4,-2 -5.4,-7.375 -5.4,-7.655 -5.4,-7.78 -5.18,-8 -4.98,-8 -4.76,-7.78 -4.76,-7.655 -4.76,-7.375 -4.76,-2 ; -2.86,-2 -2.86,-7.375 -2.86,-7.655 -2.86,-7.78 -2.64,-8 -2.44,-8 -2.22,-7.78 -2.22,-7.655 -2.22,-7.375 -2.22,-2 ; -0.32,-2 -0.32,-7.375 -0.32,-7.655 -0.32,-7.78 -0.1,-8 0.1,-8 0.32,-7.78 0.32,-7.655 0.32,-7.375 0.32,-2 ; 2.22,-2 2.22,-7.375 2.22,-7.655 2.22,-7.78 2.44,-8 2.64,-8 2.86,-7.78 2.86,-7.655 2.86,-7.375 2.86,-2 ; 4.76,-2 4.76,-7.375 4.76,-7.655 4.76,-7.78 4.98,-8 5.18,-8 5.4,-7.78 5.4,-7.655 5.4,-7.375 5.4,-2 ; 7.3,-2 7.3,-7.375 7.3,-7.655 7.3,-7.78 7.52,-8 7.72,-8 7.94,-7.78 7.94,-7.655 7.94,-7.375 7.94,-2 ; 9.84,-2 9.84,-7.375 9.84,-7.655 9.84,-7.78 10.06,-8 10.26,-8 10.48,-7.78 10.48,-7.655 10.48,-7.375 10.48,-2 ; 12.38,-2 12.38,-7.375 12.38,-7.655 12.38,-7.78 12.6,-8 12.8,-8 13.02,-7.78 13.02,-7.655 13.02,-7.375 13.02,-2 ; 14.92,-2 14.92,-7.375 14.92,-7.655 14.92,-7.78 15.14,-8 15.34,-8 15.56,-7.78 15.56,-7.655 15.56,-7.375 15.56,-2 ; -16.51,-2 16.51,-2 16.51,2 -16.51,2 -16.51,-2
Mechanical 15:
  lines w0.05: -0.5,0 0.5,0 ; 0,-0.5 0,0.5 ; -16.86,-8.125 -16.86,8.87 16.86,8.87 16.86,-8.125 -16.86,-8.125
3D body "610126249121.stp": height 5.1, standoff -1.38, extent -16.51,-8 16.51,8.16